# Altium footprint library XH，VH.PcbLib: 67 footprints (part 3 of 5)
Each footprint in its own frame and in the unit in brackets; x right, y up, seen from the top. Pads: shape width x height; smd on the part's side, far side on the other; paste and mask are expansions set on the pad; w line width, h text height; cw(c..) or ccw(c..) is an arc to the next point about the centre after c.
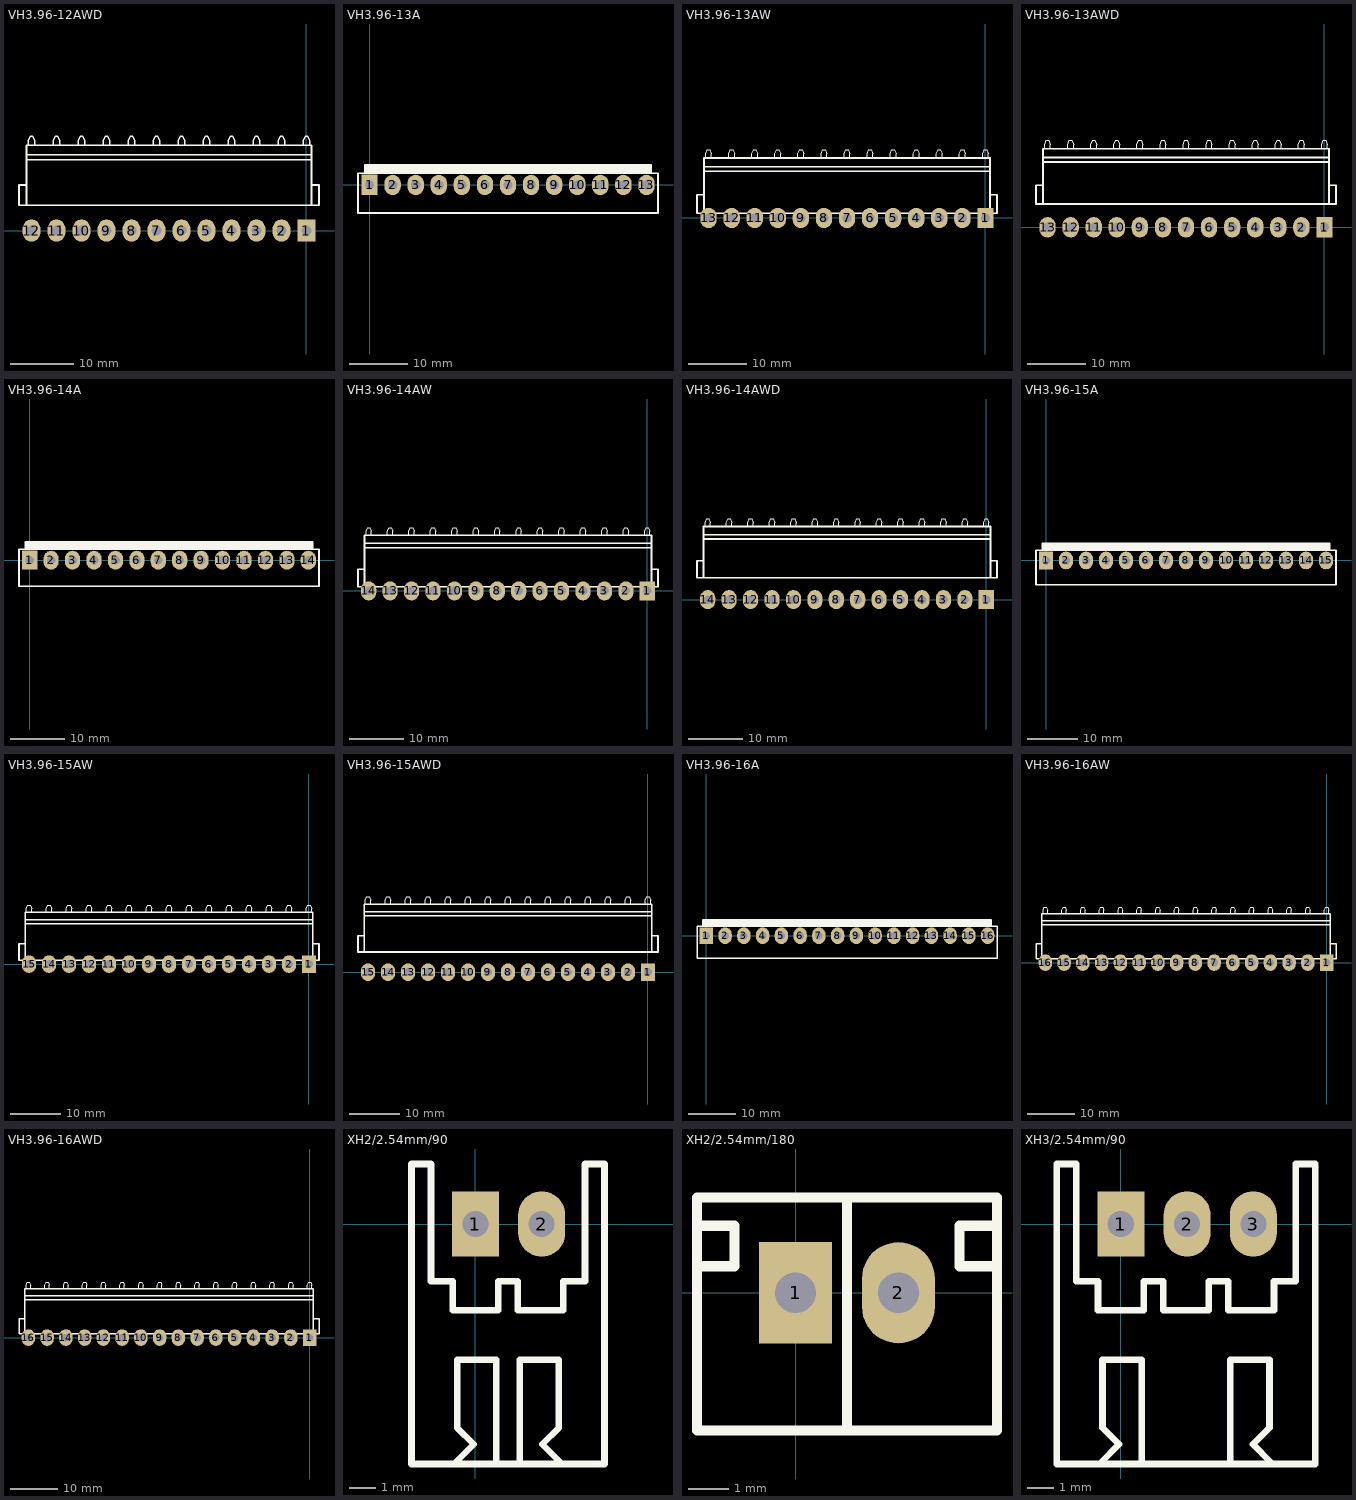
[diagram p2: the footprints below, top view; thin cyan lines are the x and y axes]

## VH3.96-12AWD [mm]
pads (12):
  rect 2.8x3.5 hole 1.6: 1(0,0)
  oval 2.8x3.5 hole 1.6: 2(-3.96,0) 3(-7.92,0) 4(-11.88,0) 5(-15.84,0) 6(-19.8,0) 7(-23.76,0) 8(-27.72,0) 9(-31.68,0) 10(-35.64,0) 11(-39.6,0) 12(-43.56,0)
Top Overlay:
  lines w0.2: -44.06,13.5 -44.06,14.2 -43.76,14.9 -43.36,14.9 -43.06,14.2 -43.06,13.5 ; -40.1,13.5 -40.1,14.2 -39.8,14.9 -39.4,14.9 -39.1,14.2 -39.1,13.5 ; -36.14,13.5 -36.14,14.2 -35.84,14.9 -35.44,14.9 -35.14,14.2 -35.14,13.5 ; -32.18,13.5 -32.18,14.2 -31.88,14.9 -31.48,14.9 -31.18,14.2 -31.18,13.5 ; -28.22,13.5 -28.22,14.2 -27.92,14.9 -27.52,14.9 -27.22,14.2 -27.22,13.5 ; -24.26,13.5 -24.26,14.2 -23.96,14.9 -23.56,14.9 -23.26,14.2 -23.26,13.5 ; -20.3,13.5 -20.3,14.2 -20,14.9 -19.6,14.9 -19.3,14.2 -19.3,13.5 ; -16.34,13.5 -16.34,14.2 -16.04,14.9 -15.64,14.9 -15.34,14.2 -15.34,13.5 ; -12.38,13.5 -12.38,14.2 -12.08,14.9 -11.68,14.9 -11.38,14.2 -11.38,13.5 ; -8.42,13.5 -8.42,14.2 -8.12,14.9 -7.72,14.9 -7.42,14.2 -7.42,13.5 ; -4.46,13.5 -4.46,14.2 -4.16,14.9 -3.76,14.9 -3.46,14.2 -3.46,13.5 ; -0.5,13.5 -0.5,14.2 -0.2,14.9 0.2,14.9 0.5,14.2 0.5,13.5
  lines w0.3: -44.34,4 -44.34,13.5 0.78,13.5 0.78,4 ; -44.34,7.2 -45.54,7.2 -45.54,4 1.98,4 1.98,7.2 0.78,7.2 ; -44.34,11.2 0.78,11.2 ; -44.34,12 0.78,12
3D body "VH3.96-12AW.STEP": height 8.4, standoff -3.6, extent -45.54,-0.55 1.98,14.9

## VH3.96-13A [mm]
pads (13):
  rect 2.8x3.5 hole 1.6: 1(0,0)
  oval 2.8x3.5 hole 1.6: 2(3.96,0) 3(7.92,0) 4(11.88,0) 5(15.84,0) 6(19.8,0) 7(23.76,0) 8(27.72,0) 9(31.68,0) 10(35.64,0) 11(39.6,0) 12(43.56,0) 13(47.52,0)
Top Overlay:
  lines w0.3: -0.78,2 -0.78,3.4 48.3,3.4 48.3,2 ; -0.78,2.159 48.3,2.159 ; -0.78,2.413 48.3,2.413 ; -0.78,2.667 48.3,2.667 ; -0.78,2.921 48.3,2.921 ; -0.78,3.175 48.3,3.175 ; -1.98,-4.8 49.5,-4.8 49.5,2 -1.98,2 -1.98,-4.8
3D body "VH3.96-13A.STEP": height 14.6, standoff -3.6, extent -1.98,-4.8 49.5,3.6

## VH3.96-13AW [mm]
pads (13):
  rect 2.8x3.5 hole 1.6: 1(0,0)
  oval 2.8x3.5 hole 1.6: 2(-3.96,0) 3(-7.92,0) 4(-11.88,0) 5(-15.84,0) 6(-19.8,0) 7(-23.76,0) 8(-27.72,0) 9(-31.68,0) 10(-35.64,0) 11(-39.6,0) 12(-43.56,0) 13(-47.52,0)
Top Overlay:
  lines w0.2: -48.02,10.3 -48.02,11 -47.72,11.7 -47.32,11.7 -47.02,11 -47.02,10.3 ; -44.06,10.3 -44.06,11 -43.76,11.7 -43.36,11.7 -43.06,11 -43.06,10.3 ; -40.1,10.3 -40.1,11 -39.8,11.7 -39.4,11.7 -39.1,11 -39.1,10.3 ; -36.14,10.3 -36.14,11 -35.84,11.7 -35.44,11.7 -35.14,11 -35.14,10.3 ; -32.18,10.3 -32.18,11 -31.88,11.7 -31.48,11.7 -31.18,11 -31.18,10.3 ; -28.22,10.3 -28.22,11 -27.92,11.7 -27.52,11.7 -27.22,11 -27.22,10.3 ; -24.26,10.3 -24.26,11 -23.96,11.7 -23.56,11.7 -23.26,11 -23.26,10.3 ; -20.3,10.3 -20.3,11 -20,11.7 -19.6,11.7 -19.3,11 -19.3,10.3 ; -16.34,10.3 -16.34,11 -16.04,11.7 -15.64,11.7 -15.34,11 -15.34,10.3 ; -12.38,10.3 -12.38,11 -12.08,11.7 -11.68,11.7 -11.38,11 -11.38,10.3 ; -8.42,10.3 -8.42,11 -8.12,11.7 -7.72,11.7 -7.42,11 -7.42,10.3 ; -4.46,10.3 -4.46,11 -4.16,11.7 -3.76,11.7 -3.46,11 -3.46,10.3 ; -0.5,10.3 -0.5,11 -0.2,11.7 0.2,11.7 0.5,11 0.5,10.3
  lines w0.3: -48.3,0.8 -48.3,10.3 0.78,10.3 0.78,0.8 ; -48.3,4 -49.5,4 -49.5,0.8 1.98,0.8 1.98,4 0.78,4 ; -48.3,8 0.78,8 ; -48.3,8.8 0.78,8.8
3D body "VH3.96-13AW.STEP": height 8.4, standoff -3.6, extent -49.5,-0.55 1.98,11.7

## VH3.96-13AWD [mm]
pads (13):
  rect 2.8x3.5 hole 1.6: 1(0,0)
  oval 2.8x3.5 hole 1.6: 2(-3.96,0) 3(-7.92,0) 4(-11.88,0) 5(-15.84,0) 6(-19.8,0) 7(-23.76,0) 8(-27.72,0) 9(-31.68,0) 10(-35.64,0) 11(-39.6,0) 12(-43.56,0) 13(-47.52,0)
Top Overlay:
  lines w0.2: -48.02,13.5 -48.02,14.2 -47.72,14.9 -47.32,14.9 -47.02,14.2 -47.02,13.5 ; -44.06,13.5 -44.06,14.2 -43.76,14.9 -43.36,14.9 -43.06,14.2 -43.06,13.5 ; -40.1,13.5 -40.1,14.2 -39.8,14.9 -39.4,14.9 -39.1,14.2 -39.1,13.5 ; -36.14,13.5 -36.14,14.2 -35.84,14.9 -35.44,14.9 -35.14,14.2 -35.14,13.5 ; -32.18,13.5 -32.18,14.2 -31.88,14.9 -31.48,14.9 -31.18,14.2 -31.18,13.5 ; -28.22,13.5 -28.22,14.2 -27.92,14.9 -27.52,14.9 -27.22,14.2 -27.22,13.5 ; -24.26,13.5 -24.26,14.2 -23.96,14.9 -23.56,14.9 -23.26,14.2 -23.26,13.5 ; -20.3,13.5 -20.3,14.2 -20,14.9 -19.6,14.9 -19.3,14.2 -19.3,13.5 ; -16.34,13.5 -16.34,14.2 -16.04,14.9 -15.64,14.9 -15.34,14.2 -15.34,13.5 ; -12.38,13.5 -12.38,14.2 -12.08,14.9 -11.68,14.9 -11.38,14.2 -11.38,13.5 ; -8.42,13.5 -8.42,14.2 -8.12,14.9 -7.72,14.9 -7.42,14.2 -7.42,13.5 ; -4.46,13.5 -4.46,14.2 -4.16,14.9 -3.76,14.9 -3.46,14.2 -3.46,13.5 ; -0.5,13.5 -0.5,14.2 -0.2,14.9 0.2,14.9 0.5,14.2 0.5,13.5
  lines w0.3: -48.3,4 -48.3,13.5 0.78,13.5 0.78,4 ; -48.3,7.2 -49.5,7.2 -49.5,4 1.98,4 1.98,7.2 0.78,7.2 ; -48.3,11.2 0.78,11.2 ; -48.3,12 0.78,12
3D body "VH3.96-13AW.STEP": height 8.4, standoff -3.6, extent -49.5,-0.55 1.98,14.9

## VH3.96-14A [mm]
pads (14):
  rect 2.8x3.5 hole 1.6: 1(0,0)
  oval 2.8x3.5 hole 1.6: 2(3.96,0) 3(7.92,0) 4(11.88,0) 5(15.84,0) 6(19.8,0) 7(23.76,0) 8(27.72,0) 9(31.68,0) 10(35.64,0) 11(39.6,0) 12(43.56,0) 13(47.52,0) 14(51.48,0)
Top Overlay:
  lines w0.3: -0.78,2 -0.78,3.4 52.26,3.4 52.26,2 ; -0.78,2.159 52.26,2.159 ; -0.78,2.413 52.26,2.413 ; -0.78,2.667 52.26,2.667 ; -0.78,2.921 52.26,2.921 ; -0.78,3.175 52.26,3.175 ; -1.98,-4.8 -1.98,2 53.46,2 53.46,-4.8 -1.98,-4.8
3D body "VH3.96-14A.STEP": height 14.6, standoff -3.6, extent -1.98,-4.8 53.46,3.6

## VH3.96-14AW [mm]
pads (14):
  rect 2.8x3.5 hole 1.6: 1(0,0)
  oval 2.8x3.5 hole 1.6: 2(-3.96,0) 3(-7.92,0) 4(-11.88,0) 5(-15.84,0) 6(-19.8,0) 7(-23.76,0) 8(-27.72,0) 9(-31.68,0) 10(-35.64,0) 11(-39.6,0) 12(-43.56,0) 13(-47.52,0) 14(-51.48,0)
Top Overlay:
  lines w0.2: -51.98,10.3 -51.98,11 -51.68,11.7 -51.28,11.7 -50.98,11 -50.98,10.3 ; -48.02,10.3 -48.02,11 -47.72,11.7 -47.32,11.7 -47.02,11 -47.02,10.3 ; -44.06,10.3 -44.06,11 -43.76,11.7 -43.36,11.7 -43.06,11 -43.06,10.3 ; -40.1,10.3 -40.1,11 -39.8,11.7 -39.4,11.7 -39.1,11 -39.1,10.3 ; -36.14,10.3 -36.14,11 -35.84,11.7 -35.44,11.7 -35.14,11 -35.14,10.3 ; -32.18,10.3 -32.18,11 -31.88,11.7 -31.48,11.7 -31.18,11 -31.18,10.3 ; -28.22,10.3 -28.22,11 -27.92,11.7 -27.52,11.7 -27.22,11 -27.22,10.3 ; -24.26,10.3 -24.26,11 -23.96,11.7 -23.56,11.7 -23.26,11 -23.26,10.3 ; -20.3,10.3 -20.3,11 -20,11.7 -19.6,11.7 -19.3,11 -19.3,10.3 ; -16.34,10.3 -16.34,11 -16.04,11.7 -15.64,11.7 -15.34,11 -15.34,10.3 ; -12.38,10.3 -12.38,11 -12.08,11.7 -11.68,11.7 -11.38,11 -11.38,10.3 ; -8.42,10.3 -8.42,11 -8.12,11.7 -7.72,11.7 -7.42,11 -7.42,10.3 ; -4.46,10.3 -4.46,11 -4.16,11.7 -3.76,11.7 -3.46,11 -3.46,10.3 ; -0.5,10.3 -0.5,11 -0.2,11.7 0.2,11.7 0.5,11 0.5,10.3
  lines w0.3: -52.26,0.8 -52.26,10.3 0.78,10.3 0.78,0.8 ; -52.26,4 -53.46,4 -53.46,0.8 1.98,0.8 1.98,4 0.78,4 ; -52.26,8 0.78,8 ; -52.26,8.8 0.78,8.8
3D body "VH3.96-14AW.STEP": height 8.4, standoff -3.6, extent -53.46,-0.55 1.98,11.7

## VH3.96-14AWD [mm]
pads (14):
  rect 2.8x3.5 hole 1.6: 1(0,0)
  oval 2.8x3.5 hole 1.6: 2(-3.96,0) 3(-7.92,0) 4(-11.88,0) 5(-15.84,0) 6(-19.8,0) 7(-23.76,0) 8(-27.72,0) 9(-31.68,0) 10(-35.64,0) 11(-39.6,0) 12(-43.56,0) 13(-47.52,0) 14(-51.48,0)
Top Overlay:
  lines w0.2: -51.98,13.5 -51.98,14.2 -51.68,14.9 -51.28,14.9 -50.98,14.2 -50.98,13.5 ; -48.02,13.5 -48.02,14.2 -47.72,14.9 -47.32,14.9 -47.02,14.2 -47.02,13.5 ; -44.06,13.5 -44.06,14.2 -43.76,14.9 -43.36,14.9 -43.06,14.2 -43.06,13.5 ; -40.1,13.5 -40.1,14.2 -39.8,14.9 -39.4,14.9 -39.1,14.2 -39.1,13.5 ; -36.14,13.5 -36.14,14.2 -35.84,14.9 -35.44,14.9 -35.14,14.2 -35.14,13.5 ; -32.18,13.5 -32.18,14.2 -31.88,14.9 -31.48,14.9 -31.18,14.2 -31.18,13.5 ; -28.22,13.5 -28.22,14.2 -27.92,14.9 -27.52,14.9 -27.22,14.2 -27.22,13.5 ; -24.26,13.5 -24.26,14.2 -23.96,14.9 -23.56,14.9 -23.26,14.2 -23.26,13.5 ; -20.3,13.5 -20.3,14.2 -20,14.9 -19.6,14.9 -19.3,14.2 -19.3,13.5 ; -16.34,13.5 -16.34,14.2 -16.04,14.9 -15.64,14.9 -15.34,14.2 -15.34,13.5 ; -12.38,13.5 -12.38,14.2 -12.08,14.9 -11.68,14.9 -11.38,14.2 -11.38,13.5 ; -8.42,13.5 -8.42,14.2 -8.12,14.9 -7.72,14.9 -7.42,14.2 -7.42,13.5 ; -4.46,13.5 -4.46,14.2 -4.16,14.9 -3.76,14.9 -3.46,14.2 -3.46,13.5 ; -0.5,13.5 -0.5,14.2 -0.2,14.9 0.2,14.9 0.5,14.2 0.5,13.5
  lines w0.3: -52.26,4 -52.26,13.5 0.78,13.5 0.78,4 ; -52.26,7.2 -53.46,7.2 -53.46,4 1.98,4 1.98,7.2 0.78,7.2 ; -52.26,11.2 0.78,11.2 ; -52.26,12 0.78,12
3D body "VH3.96-14AW.STEP": height 8.4, standoff -3.6, extent -53.46,-0.55 1.98,14.9

## VH3.96-15A [mm]
pads (15):
  rect 2.8x3.5 hole 1.6: 1(0,0)
  oval 2.8x3.5 hole 1.6: 2(3.96,0) 3(7.92,0) 4(11.88,0) 5(15.84,0) 6(19.8,0) 7(23.76,0) 8(27.72,0) 9(31.68,0) 10(35.64,0) 11(39.6,0) 12(43.56,0) 13(47.52,0) 14(51.48,0) 15(55.44,0)
Top Overlay:
  lines w0.3: -0.78,2 -0.78,3.4 56.22,3.4 56.22,2 ; -0.78,2.159 56.22,2.159 ; -0.78,2.413 56.22,2.413 ; -0.78,2.667 56.22,2.667 ; -0.78,2.921 56.22,2.921 ; -0.78,3.175 56.22,3.175 ; -1.98,-4.8 57.42,-4.8 57.42,2 -1.98,2 -1.98,-4.8
3D body "VH3.96-15A.STEP": height 14.6, standoff -3.6, extent -1.98,-4.8 57.42,3.6

## VH3.96-15AW [mm]
pads (15):
  rect 2.8x3.5 hole 1.6: 1(0,0)
  oval 2.8x3.5 hole 1.6: 2(-3.96,0) 3(-7.92,0) 4(-11.88,0) 5(-15.84,0) 6(-19.8,0) 7(-23.76,0) 8(-27.72,0) 9(-31.68,0) 10(-35.64,0) 11(-39.6,0) 12(-43.56,0) 13(-47.52,0) 14(-51.48,0) 15(-55.44,0)
Top Overlay:
  lines w0.2: -55.94,10.3 -55.94,11 -55.64,11.7 -55.24,11.7 -54.94,11 -54.94,10.3 ; -51.98,10.3 -51.98,11 -51.68,11.7 -51.28,11.7 -50.98,11 -50.98,10.3 ; -48.02,10.3 -48.02,11 -47.72,11.7 -47.32,11.7 -47.02,11 -47.02,10.3 ; -44.06,10.3 -44.06,11 -43.76,11.7 -43.36,11.7 -43.06,11 -43.06,10.3 ; -40.1,10.3 -40.1,11 -39.8,11.7 -39.4,11.7 -39.1,11 -39.1,10.3 ; -36.14,10.3 -36.14,11 -35.84,11.7 -35.44,11.7 -35.14,11 -35.14,10.3 ; -32.18,10.3 -32.18,11 -31.88,11.7 -31.48,11.7 -31.18,11 -31.18,10.3 ; -28.22,10.3 -28.22,11 -27.92,11.7 -27.52,11.7 -27.22,11 -27.22,10.3 ; -24.26,10.3 -24.26,11 -23.96,11.7 -23.56,11.7 -23.26,11 -23.26,10.3 ; -20.3,10.3 -20.3,11 -20,11.7 -19.6,11.7 -19.3,11 -19.3,10.3 ; -16.34,10.3 -16.34,11 -16.04,11.7 -15.64,11.7 -15.34,11 -15.34,10.3 ; -12.38,10.3 -12.38,11 -12.08,11.7 -11.68,11.7 -11.38,11 -11.38,10.3 ; -8.42,10.3 -8.42,11 -8.12,11.7 -7.72,11.7 -7.42,11 -7.42,10.3 ; -4.46,10.3 -4.46,11 -4.16,11.7 -3.76,11.7 -3.46,11 -3.46,10.3 ; -0.5,10.3 -0.5,11 -0.2,11.7 0.2,11.7 0.5,11 0.5,10.3
  lines w0.3: -56.22,0.8 -56.22,10.3 0.78,10.3 0.78,0.8 ; -56.22,4 -57.42,4 -57.42,0.8 1.98,0.8 1.98,4 0.78,4 ; -56.22,8 0.78,8 ; -56.22,8.8 0.78,8.8
3D body "VH3.96-15AW.STEP": height 8.4, standoff -3.6, extent -57.42,-0.55 1.98,11.7

## VH3.96-15AWD [mm]
pads (15):
  rect 2.8x3.5 hole 1.6: 1(0,0)
  oval 2.8x3.5 hole 1.6: 2(-3.96,0) 3(-7.92,0) 4(-11.88,0) 5(-15.84,0) 6(-19.8,0) 7(-23.76,0) 8(-27.72,0) 9(-31.68,0) 10(-35.64,0) 11(-39.6,0) 12(-43.56,0) 13(-47.52,0) 14(-51.48,0) 15(-55.44,0)
Top Overlay:
  lines w0.2: -55.94,13.5 -55.94,14.2 -55.64,14.9 -55.24,14.9 -54.94,14.2 -54.94,13.5 ; -51.98,13.5 -51.98,14.2 -51.68,14.9 -51.28,14.9 -50.98,14.2 -50.98,13.5 ; -48.02,13.5 -48.02,14.2 -47.72,14.9 -47.32,14.9 -47.02,14.2 -47.02,13.5 ; -44.06,13.5 -44.06,14.2 -43.76,14.9 -43.36,14.9 -43.06,14.2 -43.06,13.5 ; -40.1,13.5 -40.1,14.2 -39.8,14.9 -39.4,14.9 -39.1,14.2 -39.1,13.5 ; -36.14,13.5 -36.14,14.2 -35.84,14.9 -35.44,14.9 -35.14,14.2 -35.14,13.5 ; -32.18,13.5 -32.18,14.2 -31.88,14.9 -31.48,14.9 -31.18,14.2 -31.18,13.5 ; -28.22,13.5 -28.22,14.2 -27.92,14.9 -27.52,14.9 -27.22,14.2 -27.22,13.5 ; -24.26,13.5 -24.26,14.2 -23.96,14.9 -23.56,14.9 -23.26,14.2 -23.26,13.5 ; -20.3,13.5 -20.3,14.2 -20,14.9 -19.6,14.9 -19.3,14.2 -19.3,13.5 ; -16.34,13.5 -16.34,14.2 -16.04,14.9 -15.64,14.9 -15.34,14.2 -15.34,13.5 ; -12.38,13.5 -12.38,14.2 -12.08,14.9 -11.68,14.9 -11.38,14.2 -11.38,13.5 ; -8.42,13.5 -8.42,14.2 -8.12,14.9 -7.72,14.9 -7.42,14.2 -7.42,13.5 ; -4.46,13.5 -4.46,14.2 -4.16,14.9 -3.76,14.9 -3.46,14.2 -3.46,13.5 ; -0.5,13.5 -0.5,14.2 -0.2,14.9 0.2,14.9 0.5,14.2 0.5,13.5
  lines w0.3: -56.22,4 -56.22,13.5 0.78,13.5 0.78,4 ; -56.22,7.2 -57.42,7.2 -57.42,4 1.98,4 1.98,7.2 0.78,7.2 ; -56.22,11.2 0.78,11.2 ; -56.22,12 0.78,12
3D body "VH3.96-15AW.STEP": height 8.4, standoff -3.6, extent -57.42,-0.55 1.98,14.9

## VH3.96-16A [mm]
pads (16):
  rect 2.8x3.5 hole 1.6: 1(0,0)
  oval 2.8x3.5 hole 1.6: 2(3.96,0) 3(7.92,0) 4(11.88,0) 5(15.84,0) 6(19.8,0) 7(23.76,0) 8(27.72,0) 9(31.68,0) 10(35.64,0) 11(39.6,0) 12(43.56,0) 13(47.52,0) 14(51.48,0) 15(55.44,0) 16(59.4,0)
Top Overlay:
  lines w0.3: -0.78,2 -0.78,3.4 60.18,3.4 60.18,2 ; -0.78,2.159 60.18,2.159 ; -0.78,2.413 60.18,2.413 ; -0.78,2.667 60.18,2.667 ; -0.78,2.921 60.18,2.921 ; -0.78,3.175 60.18,3.175 ; -1.98,-4.8 -1.98,2 61.38,2 61.38,-4.8 -1.98,-4.8
3D body "VH3.96-16A.STEP": height 14.6, standoff -3.6, extent -1.98,-4.8 61.38,3.6

## VH3.96-16AW [mm]
pads (16):
  rect 2.8x3.5 hole 1.6: 1(0,0)
  oval 2.8x3.5 hole 1.6: 2(-3.96,0) 3(-7.92,0) 4(-11.88,0) 5(-15.84,0) 6(-19.8,0) 7(-23.76,0) 8(-27.72,0) 9(-31.68,0) 10(-35.64,0) 11(-39.6,0) 12(-43.56,0) 13(-47.52,0) 14(-51.48,0) 15(-55.44,0) 16(-59.4,0)
Top Overlay:
  lines w0.2: -59.9,10.3 -59.9,11 -59.6,11.7 -59.2,11.7 -58.9,11 -58.9,10.3 ; -55.94,10.3 -55.94,11 -55.64,11.7 -55.24,11.7 -54.94,11 -54.94,10.3 ; -51.98,10.3 -51.98,11 -51.68,11.7 -51.28,11.7 -50.98,11 -50.98,10.3 ; -48.02,10.3 -48.02,11 -47.72,11.7 -47.32,11.7 -47.02,11 -47.02,10.3 ; -44.06,10.3 -44.06,11 -43.76,11.7 -43.36,11.7 -43.06,11 -43.06,10.3 ; -40.1,10.3 -40.1,11 -39.8,11.7 -39.4,11.7 -39.1,11 -39.1,10.3 ; -36.14,10.3 -36.14,11 -35.84,11.7 -35.44,11.7 -35.14,11 -35.14,10.3 ; -32.18,10.3 -32.18,11 -31.88,11.7 -31.48,11.7 -31.18,11 -31.18,10.3 ; -28.22,10.3 -28.22,11 -27.92,11.7 -27.52,11.7 -27.22,11 -27.22,10.3 ; -24.26,10.3 -24.26,11 -23.96,11.7 -23.56,11.7 -23.26,11 -23.26,10.3 ; -20.3,10.3 -20.3,11 -20,11.7 -19.6,11.7 -19.3,11 -19.3,10.3 ; -16.34,10.3 -16.34,11 -16.04,11.7 -15.64,11.7 -15.34,11 -15.34,10.3 ; -12.38,10.3 -12.38,11 -12.08,11.7 -11.68,11.7 -11.38,11 -11.38,10.3 ; -8.42,10.3 -8.42,11 -8.12,11.7 -7.72,11.7 -7.42,11 -7.42,10.3 ; -4.46,10.3 -4.46,11 -4.16,11.7 -3.76,11.7 -3.46,11 -3.46,10.3 ; -0.5,10.3 -0.5,11 -0.2,11.7 0.2,11.7 0.5,11 0.5,10.3
  lines w0.3: -60.18,0.8 -60.18,10.3 0.78,10.3 0.78,0.8 ; -60.18,4 -61.38,4 -61.38,0.8 1.98,0.8 1.98,4 0.78,4 ; -60.18,8 0.78,8 ; -60.18,8.8 0.78,8.8
3D body "VH3.96-16AW.STEP": height 8.4, standoff -3.6, extent -61.38,-0.55 1.98,11.7

## VH3.96-16AWD [mm]
pads (16):
  rect 2.8x3.5 hole 1.6: 1(0,0)
  oval 2.8x3.5 hole 1.6: 2(-3.96,0) 3(-7.92,0) 4(-11.88,0) 5(-15.84,0) 6(-19.8,0) 7(-23.76,0) 8(-27.72,0) 9(-31.68,0) 10(-35.64,0) 11(-39.6,0) 12(-43.56,0) 13(-47.52,0) 14(-51.48,0) 15(-55.44,0) 16(-59.4,0)
Top Overlay:
  lines w0.2: -59.9,10.3 -59.9,11 -59.6,11.7 -59.2,11.7 -58.9,11 -58.9,10.3 ; -55.94,10.3 -55.94,11 -55.64,11.7 -55.24,11.7 -54.94,11 -54.94,10.3 ; -51.98,10.3 -51.98,11 -51.68,11.7 -51.28,11.7 -50.98,11 -50.98,10.3 ; -48.02,10.3 -48.02,11 -47.72,11.7 -47.32,11.7 -47.02,11 -47.02,10.3 ; -44.06,10.3 -44.06,11 -43.76,11.7 -43.36,11.7 -43.06,11 -43.06,10.3 ; -40.1,10.3 -40.1,11 -39.8,11.7 -39.4,11.7 -39.1,11 -39.1,10.3 ; -36.14,10.3 -36.14,11 -35.84,11.7 -35.44,11.7 -35.14,11 -35.14,10.3 ; -32.18,10.3 -32.18,11 -31.88,11.7 -31.48,11.7 -31.18,11 -31.18,10.3 ; -28.22,10.3 -28.22,11 -27.92,11.7 -27.52,11.7 -27.22,11 -27.22,10.3 ; -24.26,10.3 -24.26,11 -23.96,11.7 -23.56,11.7 -23.26,11 -23.26,10.3 ; -20.3,10.3 -20.3,11 -20,11.7 -19.6,11.7 -19.3,11 -19.3,10.3 ; -16.34,10.3 -16.34,11 -16.04,11.7 -15.64,11.7 -15.34,11 -15.34,10.3 ; -12.38,10.3 -12.38,11 -12.08,11.7 -11.68,11.7 -11.38,11 -11.38,10.3 ; -8.42,10.3 -8.42,11 -8.12,11.7 -7.72,11.7 -7.42,11 -7.42,10.3 ; -4.46,10.3 -4.46,11 -4.16,11.7 -3.76,11.7 -3.46,11 -3.46,10.3 ; -0.5,10.3 -0.5,11 -0.2,11.7 0.2,11.7 0.5,11 0.5,10.3
  lines w0.3: -60.18,0.8 -60.18,10.3 0.78,10.3 0.78,0.8 ; -60.18,4 -61.38,4 -61.38,0.8 1.98,0.8 1.98,4 0.78,4 ; -60.18,8 0.78,8 ; -60.18,8.8 0.78,8.8
3D body "VH3.96-16AW.STEP": height 8.4, standoff -3.6, extent -61.38,-0.55 1.98,11.7

## XH2/2.54mm/90 [mm]
pads (2):
  rect 1.8x2.5 hole 1: 1(0,0)
  oval 1.8x2.5 hole 1: 2(2.54,0)
Top Overlay:
  lines w0.254: -0.79,-9.172 -0.064,-8.445 -0.7,-7.809 -0.7,-5.2 0.8,-5.2 0.8,-9.2 ; 1.7,-9.2 1.7,-5.2 3.2,-5.2 3.2,-7.809 2.564,-8.445 3.29,-9.172 ; -2.45,-9.2 4.95,-9.2 4.95,2.3 4.2,2.3 4.2,-2.2 3.375,-2.2 3.375,-3.3 1.625,-3.3 1.625,-2.2 0.875,-2.2 0.875,-3.3 -0.875,-3.3 -0.875,-2.2 -1.7,-2.2 -1.7,2.3 -2.45,2.3 -2.45,-9.2
3D body "JST-S2B-XH-A.STEP": height 6.1, standoff -3.4, extent -2.45,-9.2 4.95,2.3

## XH2/2.54mm/180 [mm]
pads (2):
  rect 1.8x2.5 hole 1: 1(0,0)
  oval 1.8x2.5 hole 1: 2(2.54,0)
Top Overlay:
  lines w0.254: -2.43,0.65 -1.504,0.65 -1.504,1.65 -2.43,1.65 ; 1.27,-3.4 1.27,2.35 ; 4.97,0.65 4.044,0.65 4.044,1.65 4.97,1.65 ; -2.43,-3.4 4.97,-3.4 4.97,2.35 -2.43,2.35 -2.43,-3.4
3D body "JST-B2B-XH-A.STEP": height 7, standoff -3.4, extent -2.43,-3.4 4.97,2.35

## XH3/2.54mm/90 [mm]
pads (3):
  rect 1.8x2.5 hole 1: 1(0,0)
  oval 1.8x2.5 hole 1: 2(2.54,0) 3(5.08,0)
Top Overlay:
  lines w0.254: -0.79,-9.172 -0.064,-8.445 -0.7,-7.809 -0.7,-5.2 0.8,-5.2 0.8,-9.2 ; 4.2,-9.2 4.2,-5.2 5.7,-5.2 5.7,-7.809 5.064,-8.445 5.79,-9.172 ; -2.45,-9.2 -2.45,2.3 -1.7,2.3 -1.7,-2.2 -0.875,-2.2 -0.875,-3.3 0.875,-3.3 0.875,-2.2 1.625,-2.2 1.625,-3.3 3.375,-3.3 3.375,-2.2 4.125,-2.2 4.125,-3.3 5.875,-3.3 5.875,-2.2 6.7,-2.2 6.7,2.3 7.45,2.3 7.45,-9.2 -2.45,-9.2
3D body "JST-S3B-XH-A.STEP": height 6.1, standoff -3.4, extent -2.45,-9.2 7.45,2.3